# Altium footprint library 2019-12-03_23-05-25.PcbLib: 1 footprints
Each footprint in its own frame and in the unit in brackets; x right, y up, seen from the top. Pads: shape width x height; smd on the part's side, far side on the other; paste and mask are expansions set on the pad; w line width, h text height; cw(c..) or ccw(c..) is an arc to the next point about the centre after c.
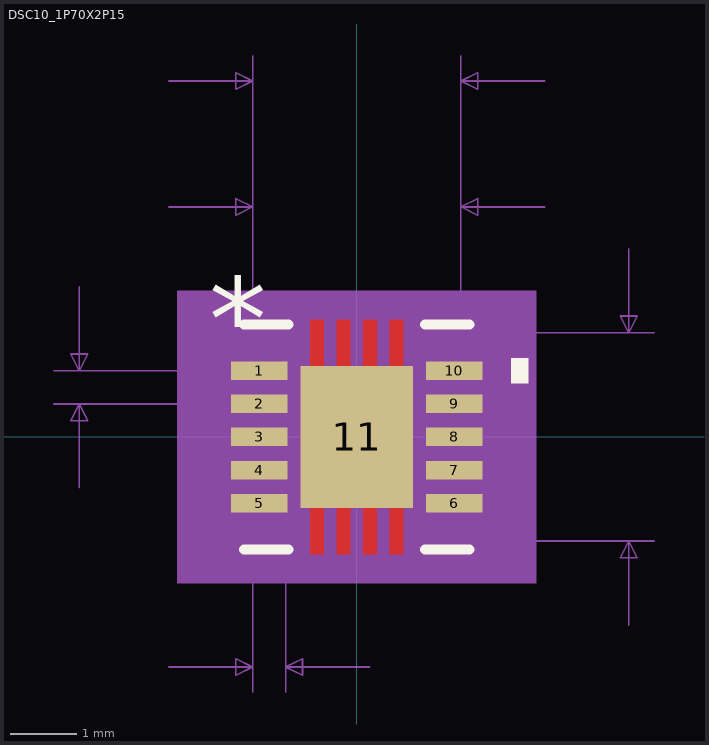
[diagram p0: the footprint, top view; thin cyan lines are the x and y axes]

## DSC10_1P70X2P15 [mm]
pads (11):
  rect 0.85x0.28 smd paste-0.412: 1(-1.475,1)
  rect 0.85x0.28 smd paste-0.14: 2(-1.475,0.5) 3(-1.475,0) 4(-1.475,-0.5) 5(-1.475,-1) 6(1.475,-1) 7(1.475,-0.5) 8(1.475,0) 9(1.475,0.5) 10(1.475,1)
  rect 1.7x2.15 smd paste-1.062 mask-1.067: 11(0,0)
Top Layer:
  region: -0.1,1.775 -0.1,1.075 -0.3,1.075 -0.3,1.775
  region: 0.1,1.775 0.1,1.075 0.3,1.075 0.3,1.775
  region: -0.5,1.775 -0.5,1.075 -0.7,1.075 -0.7,1.775
  region: 0.5,1.775 0.5,1.075 0.7,1.075 0.7,1.775
  region: -0.1,-1.775 -0.1,-1.075 -0.3,-1.075 -0.3,-1.775
  region: 0.1,-1.775 0.1,-1.075 0.3,-1.075 0.3,-1.775
  region: -0.5,-1.775 -0.5,-1.075 -0.7,-1.075 -0.7,-1.775
  region: 0.5,-1.775 0.5,-1.075 0.7,-1.075 0.7,-1.775
Top Overlay:
  region: 2.337,1.191 2.591,1.191 2.591,0.81 2.337,0.81
  lines w0.152: -1.702,-1.702 -1.033,-1.702 ; -1.702,1.702 -1.033,1.702 ; 1.033,-1.702 1.702,-1.702 ; 1.033,1.702 1.702,1.702
  text "*" at -2.23,1.153 h1.27
Top Paste:
  drawing of 27 lines, arcs and shapes, not listed
Top Solder:
  region: -0.98,1.21 -1.97,1.21 -1.97,0.79 -0.98,0.79
  region: -0.98,0.71 -1.97,0.71 -1.97,0.29 -0.98,0.29
  region: -0.98,0.21 -1.97,0.21 -1.97,-0.21 -0.98,-0.21
  region: -0.98,-0.29 -1.97,-0.29 -1.97,-0.71 -0.98,-0.71
  region: -0.98,-0.79 -1.97,-0.79 -1.97,-1.21 -0.98,-1.21
  region: 1.97,-0.79 0.98,-0.79 0.98,-1.21 1.97,-1.21
  region: 1.97,-0.29 0.98,-0.29 0.98,-0.71 1.97,-0.71
  region: 1.97,0.21 0.98,0.21 0.98,-0.21 1.97,-0.21
  region: 1.97,0.71 0.98,0.71 0.98,0.29 1.97,0.29
  region: 1.97,1.21 0.98,1.21 0.98,0.79 1.97,0.79
  region: -0.1,1.775 -0.1,1.075 -0.3,1.075 -0.3,1.775
  region: 0.1,1.775 0.1,1.075 0.3,1.075 0.3,1.775
  region: -0.5,1.775 -0.5,1.075 -0.7,1.075 -0.7,1.775
  region: 0.5,1.775 0.5,1.075 0.7,1.075 0.7,1.775
  region: -0.1,-1.775 -0.1,-1.075 -0.3,-1.075 -0.3,-1.775
  region: 0.1,-1.775 0.1,-1.075 0.3,-1.075 0.3,-1.775
  region: -0.5,-1.775 -0.5,-1.075 -0.7,-1.075 -0.7,-1.775
  region: 0.5,-1.775 0.5,-1.075 0.7,-1.075 0.7,-1.775
  region: -0.914,0.594 -0.914,1.138 0.914,1.138 0.914,0.594
  region: -0.914,-0.194 -0.914,0.194 0.914,0.194 0.914,-0.194
  region: -0.914,-1.138 -0.914,-0.594 0.914,-0.594 0.914,-1.138
  region: -0.914,-1.138 -0.914,1.138 -0.594,1.138 -0.594,-1.138
  region: 0.194,-1.138 0.194,1.138 -0.194,1.138 -0.194,-1.138
  region: 0.594,-1.138 0.594,1.138 0.914,1.138 0.914,-1.138
Mechanical 5:
  region: 2.718,-2.21 -2.718,-2.21 -2.718,2.21 2.718,2.21
Mechanical 7:
  lines w0.025: -4.579,0.5 -1.658,0.5 ; -4.579,1 -1.658,1 ; -4.198,-0.77 -4.198,0.5 ; -4.198,2.27 -4.198,1 ; -2.845,-3.48 -1.575,-3.48 ; -2.845,3.48 -1.575,3.48 ; -2.845,5.385 -1.575,5.385 ; -1.575,-3.861 -1.575,0 ; -1.575,3.861 -1.575,0 ; -1.575,5.766 -1.575,0 ; -1.075,-3.861 -1.075,0 ; 0,-1.575 4.496,-1.575 ; 0,1.575 4.496,1.575 ; 0.195,-3.48 -1.075,-3.48 ; 1.575,3.861 1.575,0 1.575,5.766 ; 2.845,3.48 1.575,3.48 ; 2.845,5.385 1.575,5.385 ; 4.115,-2.845 4.115,-1.575 ; 4.115,2.845 4.115,1.575 ; -4.198,0.5 -4.325,0.246 -4.071,0.246 -4.198,0.5 ; -4.198,1 -4.325,1.254 -4.071,1.254 -4.198,1 ; -1.575,-3.48 -1.829,-3.353 -1.829,-3.607 -1.575,-3.48 ; -1.575,3.48 -1.829,3.607 -1.829,3.353 -1.575,3.48 ; -1.575,5.385 -1.829,5.512 -1.829,5.258 -1.575,5.385 ; -1.075,-3.48 -0.821,-3.353 -0.821,-3.607 -1.075,-3.48 ; 1.575,3.48 1.829,3.607 1.829,3.353 1.575,3.48 ; 1.575,5.385 1.829,5.512 1.829,5.258 1.575,5.385 ; 4.115,-1.575 3.988,-1.829 4.242,-1.829 4.115,-1.575 ; 4.115,1.575 3.988,1.829 4.242,1.829 4.115,1.575
  text "Default Padstyle: RX33p46Y11p02D0T" at -10.795,-6.655 h1.27
  text "Pin One Padstyle: EX33p46Y11p02D0T" at -10.795,-8.179 h1.27
  text "Heat Tab Padstyle: RX66p93Y84p65D0T" at -11.112,-9.703 h1.27
  text "Via Padstyle: EX20Y20D10P" at -7.938,-11.227 h1.27
  text "Alt 1 Padstyle: OX60Y90D30P" at -8.572,-12.751 h1.27
  text "Alt 2 Padstyle: OX90Y60D30P" at -8.572,-14.275 h1.27
  text "0.124in/3.15mm" at -2.222,3.988 h0.64
  text "0.124in/3.15mm" at -2.222,5.893 h0.64
  text "0.124in/3.15mm" at 4.623,-0.318 h0.64
  text "0.02in/0.5mm" at -8.516,0.433 h0.64
  text "0.02in/0.5mm" at -3.23,-4.623 h0.64
Mechanical 13:
  lines w0: -0.305,1.575 ccw(c0,1.575) 0.305,1.575
  lines w0.025: -1.575,-1.15 -1.575,-0.85 ; -1.575,-1.15 -1.575,-0.85 ; -1.575,-1.15 -1.575,-1.15 ; -1.575,-0.85 -1.575,-0.85 ; -1.575,-0.65 -1.575,-0.35 ; -1.575,-0.65 -1.575,-0.35 ; -1.575,-0.65 -1.575,-0.65 ; -1.575,-0.35 -1.575,-0.35 ; -1.575,-0.15 -1.575,0.15 ; -1.575,-0.15 -1.575,0.15 ; -1.575,-0.15 -1.575,-0.15 ; -1.575,0.15 -1.575,0.15 ; -1.575,0.35 -1.575,0.65 ; -1.575,0.35 -1.575,0.65 ; -1.575,0.35 -1.575,0.35 ; -1.575,0.65 -1.575,0.65 ; -1.575,0.85 -1.575,1.15 ; -1.575,0.85 -1.575,1.15 ; -1.575,0.85 -1.575,0.85 ; -1.575,1.15 -1.575,1.15 ; 1.575,-1.15 1.575,-0.85 ; 1.575,-1.15 1.575,-1.15 ; 1.575,-1.15 1.575,-0.85 ; 1.575,-0.85 1.575,-0.85 ; 1.575,-0.65 1.575,-0.35 ; 1.575,-0.65 1.575,-0.65 ; 1.575,-0.65 1.575,-0.35 ; 1.575,-0.35 1.575,-0.35 ; 1.575,-0.15 1.575,0.15 ; 1.575,-0.15 1.575,-0.15 ; 1.575,-0.15 1.575,0.15 ; 1.575,0.15 1.575,0.15 ; 1.575,0.35 1.575,0.65 ; 1.575,0.35 1.575,0.35 ; 1.575,0.35 1.575,0.65 ; 1.575,0.65 1.575,0.65 ; 1.575,0.85 1.575,1.15 ; 1.575,0.85 1.575,0.85 ; 1.575,0.85 1.575,1.15 ; 1.575,1.15 1.575,1.15 ; -1.575,-1.575 1.575,-1.575 1.575,1.575 -1.575,1.575 -1.575,-1.575
  text "*" at -1.639,0.086 h1.27
Mechanical 15:
  region: -1.829,-1.301 -2.337,-1.301 -2.337,1.301 -1.829,1.301 -1.829,1.829 1.829,1.829 1.829,1.301 2.337,1.301 2.337,-1.301 1.829,-1.301 1.829,-1.829 -1.829,-1.829
  lines w0.152: -2.337,-1.301 -2.337,1.301 -1.829,1.301 -1.829,1.829 1.829,1.829 1.829,1.301 2.337,1.301 2.337,-1.301 1.829,-1.301 1.829,-1.829 -1.829,-1.829 -1.829,-1.301 -2.337,-1.301
Mechanical 16:
  circle w0.127: c-0.394,-0.394 r0.191
  circle w0.127: c-0.394,0.394 r0.191
  circle w0.127: c0.394,-0.394 r0.191
  circle w0.127: c0.394,0.394 r0.191
3D body: height 0.25, standoff 0, extent 0,0 0.254,0.254